# Altium footprint library laboE_altium.PcbLib: 676 footprints (part 20 of 43)
Each footprint in its own frame and in the unit in brackets; x right, y up, seen from the top. Pads: shape width x height; smd on the part's side, far side on the other; paste and mask are expansions set on the pad; w line width, h text height; cw(c..) or ccw(c..) is an arc to the next point about the centre after c.
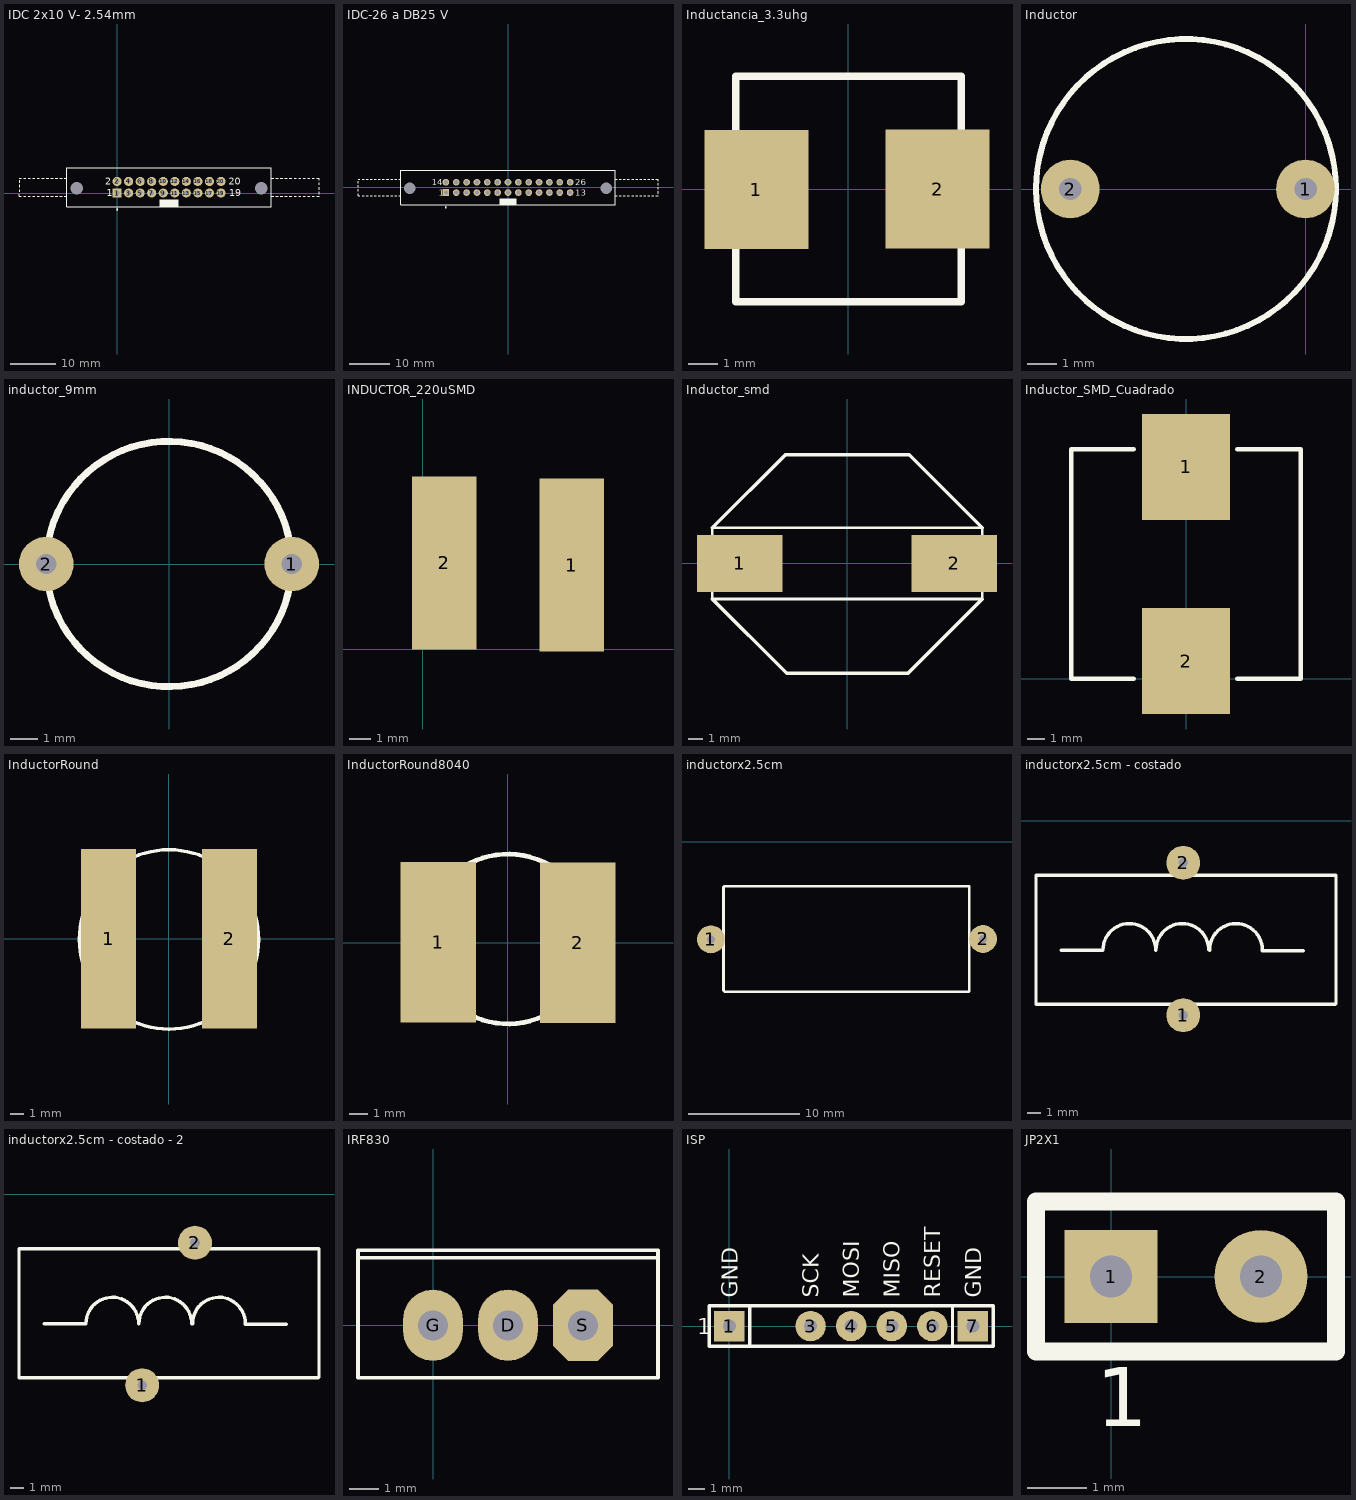
[diagram p19: the footprints below, top view; thin cyan lines are the x and y axes]

## IDC 2x10 V- 2.54mm [mm] "Connector; IDC, Thru-Hole; 20 Position; Vertical; Pitch 2.54 mm; Body 45.00 x 8.5 x 23.30 mm (LxWxH), Locking levers"
pads (22):
  rect 2x2 hole 1: 1(0,0)
  round 2 hole 1: 2(0,2.54) 3(2.54,0) 4(2.54,2.54) 5(5.08,0) 6(5.08,2.54) 7(7.62,0) 8(7.62,2.54) 9(10.16,0) 10(10.16,2.54) 11(12.7,0) 12(12.7,2.54) 13(15.24,0) 14(15.24,2.54) 15(17.78,0) 16(17.78,2.54) 17(20.32,0) 18(20.32,2.54) 19(22.86,0) 20(22.86,2.54)
  round 2.5 hole 2.8 unplated: MH1(-8.89,1.02) MH2(31.75,1.02)
Top Overlay:
  circle w0.25: c0,-3.63 r0.125
  rectangle: 9.38,-2.981 13.48,-1.431
  lines w0.2: -21.58,0.77 -21.57,0.27 ; -21.58,1.77 -21.57,1.27 ; -21.58,2.77 -21.57,2.27 ; -21.57,-0.23 -21.57,-0.73 -21.07,-0.73 ; -21.57,3.27 -21.07,3.27 ; -20.57,-0.73 -20.07,-0.73 ; -20.57,3.27 -20.07,3.27 ; -19.57,-0.73 -19.07,-0.73 ; -19.57,3.27 -19.07,3.27 ; -18.57,-0.73 -18.07,-0.73 ; -18.57,3.27 -18.07,3.27 ; -17.57,-0.73 -17.07,-0.73 ; -17.57,3.27 -17.07,3.27 ; -16.57,-0.73 -16.07,-0.73 ; -16.57,3.27 -16.07,3.27 ; -15.57,-0.73 -15.07,-0.73 ; -15.57,3.27 -15.07,3.27 ; -14.57,-0.73 -14.07,-0.73 ; -14.57,3.27 -14.07,3.27 ; -13.57,-0.73 -13.07,-0.73 ; -13.57,3.27 -13.07,3.27 ; -12.57,-0.73 -12.07,-0.73 ; -12.57,3.27 -12.07,3.27 ; -11.57,-0.73 -11.07,-0.73 ; -11.57,3.27 -11.07,3.27 ; 33.93,-0.73 34.43,-0.73 ; 33.93,3.27 34.43,3.27 ; 34.93,-0.73 35.43,-0.73 ; 34.93,3.27 35.43,3.27 ; 35.93,-0.73 36.43,-0.73 ; 35.93,3.27 36.43,3.27 ; 36.93,-0.73 37.43,-0.73 ; 36.93,3.27 37.43,3.27 ; 37.93,-0.73 38.43,-0.73 ; 37.93,3.27 38.43,3.27 ; 38.93,-0.73 39.43,-0.73 ; 38.93,3.27 39.43,3.27 ; 39.93,-0.73 40.43,-0.73 ; 39.93,3.27 40.43,3.27 ; 40.93,-0.73 41.43,-0.73 ; 40.93,3.27 41.43,3.27 ; 41.93,-0.73 42.43,-0.73 ; 41.93,3.27 42.43,3.27 ; 42.93,-0.73 43.43,-0.73 ; 42.93,3.27 43.43,3.27 ; 43.93,-0.73 44.43,-0.73 ; 43.93,3.27 44.43,3.27 44.43,2.77 ; 44.43,-0.23 44.43,0.27 ; 44.43,0.77 44.43,1.27 ; 44.43,1.77 44.43,2.27 ; -11.07,-2.98 33.93,-2.98 33.93,5.52 -11.07,5.52 -11.07,-2.98
  text "20" at 24.536,1.829 h1.5
  text "19" at 24.663,-0.711 h1.5
  text "1" at -2.261,-0.711 h1.5
  text "2" at -2.642,1.829 h1.5

## IDC-26 a DB25 V [mm]
pads (28):
  rect 1.65x1.65 hole 1: 1(-15.24,-1.27)
  round 1.65 hole 1: 2(-12.7,-1.27) 3(-10.16,-1.27) 4(-7.62,-1.27) 5(-5.08,-1.27) 6(-2.54,-1.27) 7(0,-1.27) 8(2.54,-1.27) 9(5.08,-1.27) 10(7.62,-1.27) 11(10.16,-1.27) 12(12.7,-1.27) 13(15.24,-1.27) 14(-15.24,1.27) 15(-12.7,1.27) 16(-10.16,1.27) 17(-7.62,1.27) 18(-5.08,1.27) 19(-2.54,1.27) 20(0,1.27) 21(2.54,1.27) 22(5.08,1.27) 23(7.62,1.27) 24(10.16,1.27) 25(12.7,1.27) 26(15.24,1.27)
  round 2.5 hole 2.8 unplated: MH1(-24.13,-0.25) MH2(24.13,-0.25)
Top Overlay:
  circle w0.25: c-15.24,-4.9 r0.125
  rectangle: -2.05,-4.25 2.05,-2.7
  lines w0.2: -36.8,-1.5 -36.8,-2 -36.31,-2 ; -36.8,-1 -36.8,-0.5 ; -36.8,0 -36.8,0.5 ; -36.8,1 -36.8,1.5 ; -36.8,2 -36.31,2 ; -35.81,-2 -35.31,-2 ; -35.81,2 -35.31,2 ; -34.81,-2 -34.31,-2 ; -34.81,2 -34.31,2 ; -33.81,-2 -33.31,-2 ; -33.81,2 -33.31,2 ; -32.81,-2 -32.31,-2 ; -32.81,2 -32.31,2 ; -31.81,-2 -31.31,-2 ; -31.81,2 -31.31,2 ; -30.81,-2 -30.31,-2 ; -30.81,2 -30.31,2 ; -29.81,-2 -29.31,-2 ; -29.81,2 -29.31,2 ; -28.81,-2 -28.31,-2 ; -28.81,2 -28.31,2 ; -27.81,-2 -27.31,-2 ; -27.81,2 -27.31,2 ; -26.81,-2 -26.3,-2 ; -26.81,2 -26.3,2 ; 26.3,-2 26.8,-2 ; 26.3,2 26.8,2 ; 27.3,-2 27.8,-2 ; 27.3,2 27.8,2 ; 28.3,-2 28.8,-2 ; 28.3,2 28.8,2 ; 29.3,-2 29.8,-2 ; 29.3,2 29.8,2 ; 30.3,-2 30.8,-2 ; 30.3,2 30.8,2 ; 31.3,-2 31.8,-2 ; 31.3,2 31.8,2 ; 32.3,-2 32.8,-2 ; 32.3,2 32.8,2 ; 33.3,-2 33.8,-2 ; 33.3,2 33.8,2 ; 34.3,-2 34.8,-2 ; 34.3,2 34.8,2 ; 35.3,-2 35.8,-2 ; 35.3,2 35.8,2 ; 36.3,-2 36.8,-2 ; 36.3,2 36.8,2 36.8,1.5 ; 36.8,-1.5 36.8,-1 ; 36.8,-0.5 36.8,0 ; 36.8,0.5 36.8,1 ; -26.3,-4.25 26.3,-4.25 26.3,4.25 -26.3,4.25 -26.3,-4.25
  text "13" at 16.52,-2.02 h1.5
  text "26" at 16.52,0.52 h1.5
  text "1" at -17.02,-2.02 h1.5
  text "14" at -18.669,0.508 h1.5

## Inductancia_3.3uhg [mm]
pads (2):
  rect 3.5x4 smd: 1(-3.1,-0.02) 2(3,0)
Top Overlay:
  lines w0.254: -3.8,-3.8 3.8,-3.8 3.8,3.8 -3.8,3.8 -3.8,-3.8
3D body: height 3, standoff 0, extent -3.8,-3.8 3.8,3.8

## Inductor [mm]
pads (2):
  round 2 hole 0.762: 1(0,0) 2(-8,0)
Top Overlay:
  circle w0.2: c-4.065,0 r5.1

## inductor_9mm [mm]
pads (2):
  round 2 hole 0.75: 1(4.5,0) 2(-4.5,0)
Top Overlay:
  circle w0.254: c0,0 r4.5
3D body: height 11, standoff 0, extent -4.439,-4.516 4.526,4.466

## INDUCTOR_220uSMD [mm]
pads (2):
  rect 3x8 smd: 1(6.9,3.9) 2(1,4)
3D body: height 3.5, standoff 1, extent 0.528,0.507 7.5,7.493
3D body: height 4.5, standoff 3.5, extent 0,0 8,8
3D body: height 1, standoff 0, extent 0,0 8,8

## Inductor_smd [mm]
pads (2):
  rect 6x4 smd: 1(-7.5,0) 2(7.5,0)
Top Overlay:
  lines w0.2: -9.43,-0.07 -9.43,2.49 9.47,2.5 9.47,-2.5 -9.43,-2.49 -9.43,0
  lines w0.254: -9.43,-2.49 -4.22,-7.7 -2.22,-7.7 -0.33,-7.7 1.56,-7.7 4.27,-7.7 9.47,-2.5 ; -9.43,2.49 -4.31,7.61 -2.24,7.61 -0.35,7.61 1.54,7.61 4.36,7.61 9.47,2.5
3D body: height 8, standoff 0, extent -9.431,-7.701 9.471,7.611

## Inductor_SMD_Cuadrado [mm]
pads (2):
  rect 5x6 smd: 1(0,12) 2(0,1)
Top Overlay:
  lines w0.254: -2.972,0 -6.5,0 -6.5,13 -2.972,13 ; 2.896,0 6.5,0 6.5,13 2.896,13
3D body: height 3, standoff 0, extent -2.515,-0.813 2.489,0
3D body: height 3, standoff 0, extent -2.515,13.005 2.489,13.818
3D body: height 7, standoff 0, extent -6.5,0 6.5,13

## InductorRound [mm]
pads (2):
  rect 4x13 smd: 1(-4.375,0) 2(4.375,0)
Top Overlay:
  circle w0.254: c0,-0.055 r6.5
3D body: height 2, standoff 0, extent -6.48,-6.483 6.52,6.513
3D body: height 5, standoff 2, extent -5.025,-4.973 4.975,5.024
3D body: height 7, standoff 5, extent -6.5,-6.553 6.5,6.443

## InductorRound8040 [mm]
pads (2):
  rect 4x8.5 smd: 1(-3.7,0.013) 2(3.7,-0.012)
Top Overlay:
  circle w0.254: c0,0.188 r4.5
3D body: height 7, standoff 5, extent -4.525,-4.499 4.475,4.499
3D body: height 5, standoff 2, extent -2.95,-3.074 3.05,2.924
3D body: height 2, standoff 0, extent -4.525,-4.499 4.475,4.499

## inductorx2.5cm [mm]
pads (2):
  round 2.5 hole 0.711: 1(3.303,-8.777) 2(27.741,-8.747)
Top Overlay:
  lines w0.254: 3.303,-8.777 4.453,-8.747 ; 26.5,-4.033 26.5,-4.003 ; 26.71,-8.747 27.741,-8.747 ; 26.5,-4.003 26.5,-13.43 26.44,-13.49 14.061,-13.49 4.563,-13.49 4.423,-13.35 4.423,-12.99 4.423,-4.093 4.513,-4.003 15.011,-4.003 26.5,-4.003
3D body "BOB.step": height 20.83, standoff 0.18, extent 5.261,-13.81 25.867,-3.81

## inductorx2.5cm - costado [mm]
pads (2):
  round 2.5 hole 0.711: 1(15.26,-14.31) 2(15.26,-3.1)
Top Overlay:
  lines w0.254: 4.563,-13.49 4.423,-13.49 4.423,-12.99 4.423,-4.003 26.5,-4.003 ; 4.6,-13.49 26.44,-13.49 26.5,-13.43 26.5,-4.003 ; 6.29,-9.53 9.35,-9.53 cw(c11.29,-9.51) 13.23,-9.51 ; 13.25,-9.53 cw(c15.19,-9.51) 17.13,-9.51 ; 17.2,-9.53 cw(c19.14,-9.51) 21.08,-9.51 ; 21.08,-9.56 24.09,-9.56 ; 26.5,-4.033 26.5,-4.003
3D body "BOB.step": height 20.83, standoff 0.18, extent 5.261,-13.81 25.867,-3.81

## inductorx2.5cm - costado - 2 [mil]
pads (2):
  round 98.43 hole 28: 1(531,-553) 2(684,-140)
Top Overlay:
  lines w10: 179.66,-531.11 174.15,-531.11 174.15,-511.41 174.15,-157.6 1043.31,-157.6 ; 181.1,-531.11 1040.95,-531.11 1043.31,-528.75 1043.31,-157.6 ; 247.64,-375.2 368.11,-375.2 cw(c444.49,-374.41) 520.87,-374.41 ; 521.65,-375.2 cw(c598.03,-374.41) 674.41,-374.41 ; 677.17,-375.2 cw(c753.54,-374.41) 829.93,-374.41 ; 829.93,-376.38 948.43,-376.38 ; 1043.31,-158.78 1043.31,-157.6
3D body "BOB.step": height 820.11, standoff 7.23, extent 207.11,-543.7 1018.39,-150

## IRF830 [mil]
pads (3):
  oval 80x95 / inner round 0 / far side oval 80x95 hole 40 paste+0: D(100,0) G(0,0)
  oct 80x95 / inner round 0 / far side oct 80x95 hole 40 paste+0: S(200,0)
Top Overlay:
  lines w5: -100,90 -100,100 300,100 300,90 ; -100,90 300,90 ; -100,90 -100,10 -100,-70 300,-70 300,90

## ISP [mil] "Programacion"
pads (6):
  rect 75x75 hole 32: 1(0,0) 7(600,0)
  round 75 hole 32: 3(200,0) 4(300,0) 5(400,0) 6(500,0)
Top Overlay:
  lines w7.87: 50,-50 50,50 ; 550,-50 550,50 ; -50,-50 650,-50 650,50 -50,50 -50,-50
  text "GND" at 620,70 h39.37
  text "RESET" at 520,70 h39.37
  text "MISO" at 420,70 h39.37
  text "MOSI" at 320,70 h39.37
  text "SCK" at 220,70 h39.37
  text "GND" at 20,70 h39.37
  text "1" at -80,-20 h39.37

## JP2X1 [mil]
pads (2):
  rect 62x62 hole 28: 1(0,0)
  round 62 hole 28: 2(100,0)
Top Overlay:
  lines w12: -50,-50 150,-50 150,50 -50,50 -50,-50
  text "1" at -10,-100 h39.37